# Altium footprint library TE_1986717-8.PcbLib: 1 footprints
Each footprint in its own frame and in the unit in brackets; x right, y up, seen from the top. Pads: shape width x height; smd on the part's side, far side on the other; paste and mask are expansions set on the pad; w line width, h text height; cw(c..) or ccw(c..) is an arc to the next point about the centre after c.
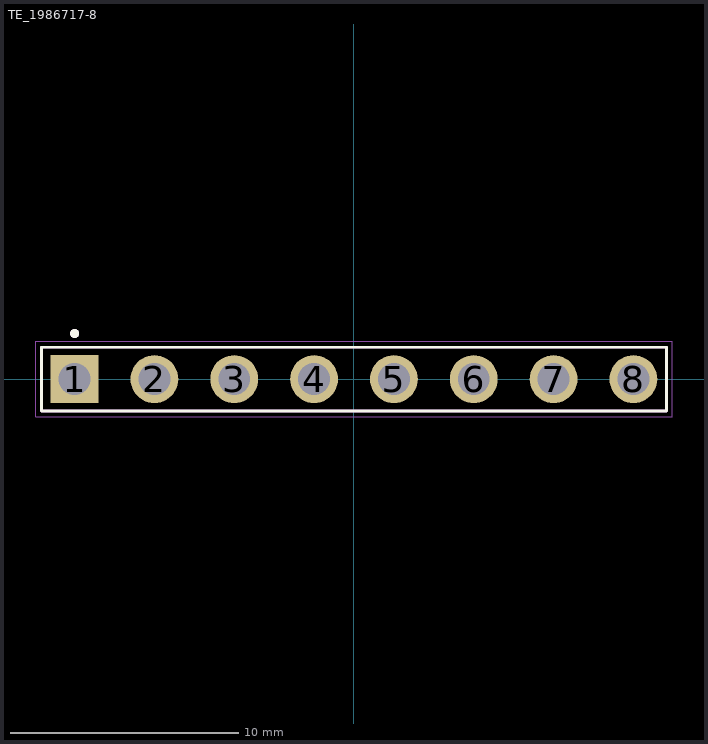
[diagram p0: the footprint, top view; thin cyan lines are the x and y axes]

## TE_1986717-8 [mm]
pads (8):
  rect 2.1x2.1 / inner round 2.1 / far side rect 2.1x2.1 hole 1.4: 1(-12.25,0)
  round 2.1 hole 1.4: 2(-8.75,0) 3(-5.25,0) 4(-1.75,0) 5(1.75,0) 6(5.25,0) 7(8.75,0) 8(12.25,0)
Top Overlay:
  circle w0.2: c-12.25,2 r0.1
  lines w0.127: -13.7,-1.4 -13.7,1.4 13.7,1.4 13.7,-1.4 -13.7,-1.4
Assembly Top:
  circle w0.2: c-12.25,2 r0.1
  lines w0.127: -13.7,-1.4 -13.7,1.4 13.7,1.4 13.7,-1.4 -13.7,-1.4
Courtyard Top:
  lines w0.05: -13.95,-1.65 -13.95,1.65 13.95,1.65 13.95,-1.65 -13.95,-1.65
3D body "step_temp.STEP": height 1.4, standoff -1.4, extent -13.7,0 13.7,12.5